# Altium integrated library 93LC66B-I_SN.IntLib: 1 symbol
Pins are listed as number, name and electrical type; pins without a type are passive.

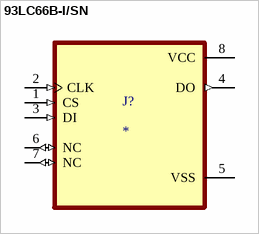
[diagram p0: symbol 93LC66B-I/SN]

## 93LC66B-I/SN
designator J?
Microchip 93LC66B-I/SN Serial EEPROM Memory, 4kbit, 2.5 to 5.5 V 8-Pin SOIC | Microchip Technology Inc. 93LC66B-I/SN; SnapEDA_Link: https://www.snapeda.com/parts/93LC66B-I/SN/Microchip+Technology/view-part/?ref=snap; Package: SOIC-8 Microchip; Value: *; MF: Microchip; MP: 93LC66B-I/SN; Check_prices: https://www.snapeda.com/parts/93LC66B-I/SN/Microchip+Technology/view-part/?ref=eda
footprint SOIC127P600X175-8N
pins: 1 CS (in), 2 CLK (in), 3 DI (in), 4 DO (out), 5 VSS (power), 6 NC (io), 7 NC (io), 8 VCC (power)